# Altium schematic symbol library USBLC6-2SC6_C7519.SchLib: 1 symbol
Pins are listed as number, name and electrical type; pins without a type are passive.

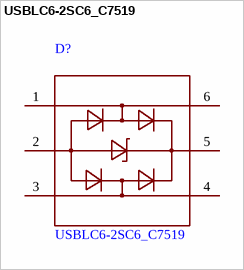
[diagram p0: symbol USBLC6-2SC6_C7519]

## USBLC6-2SC6_C7519
designator D?
单向ESD 5.25V截止 峰值脉冲电流：5A / 极性:单向 / 反向截止电压(Vrwm):5.25V / 钳位电压:17V / 峰值脉冲电流(Ipp):5A / 击穿电压(VBR):6V / 型号:USBLC6-2SC6_C7519 / LCSC C7519 / 厂牌:ST(意法半导体)
footprint SOT-23-6_L2.9-W1.6-P0.95-LS2.8-BL (PCB footprint)
pins: 1, 2, 3, 4, 5, 6